# EAGLE library part OPA4227UA_2K5 (library OPA4227UA_2K5)
Quad high precision, low noise operational amplifiers Source: Datasheet <https://www.ti.com/lit/ds/symlink/opa4227.pdf?ts=1606823862376&ref_url=https%3A%2F%2Fwww.ti.com%2Fstore%2Fti%2Fen%2Fp%2Fproduct%2F%3Fp%3DOPA4227UA%2F2K5%26keyMatch%3DOPA4227UA%2F2K5%26tisearch%3DSearch-EN-everything%26u>
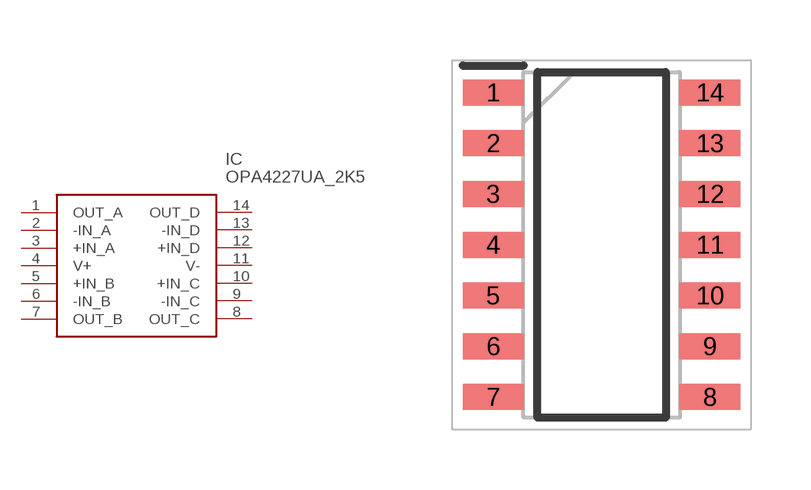
[diagram p0: symbol with the pads of SOIC127P600X175-14N; footprint SOIC127P600X175-14N]

Designator prefix IC

## OPA4227UA_2K5 (DESCRIPTION: Quad high precision, low noise operational amplifiers; HEIGHT: 1.75mm; MANUFACTURER_NAME: Texas Instruments; MANUFACTURER_PART_NUMBER: OPA4227UA/2K5; MOUSER_PART_NUMBER: 595-OPA4227UA/2K5; MOUSER_PRICE-STOCK: https://www.mouser.co.uk/ProductDetail/Texas-Instruments/OPA4227UA-2K5?qs=7nS3%252BbEUL6sszF9GzvFuhg%3D%3D)  [SOIC127P600X175-14N]
1  OUT_A
2  -IN_A
3  +IN_A
4  V+
5  +IN_B
6  -IN_B
7  OUT_B
8  OUT_C
9  -IN_C
10  +IN_C
11  V-
12  +IN_D
13  -IN_D
14  OUT_D

## Footprint SOIC127P600X175-14N (pad centres in mm)
D (R-PDSO-G14)
smd 1.525 x 0.65: 1 -2.712,3.81; 2 -2.712,2.54; 3 -2.712,1.27; 4 -2.712,0; 5 -2.712,-1.27; 6 -2.712,-2.54; 7 -2.712,-3.81; 8 2.712,-3.81; 9 2.712,-2.54; 10 2.712,-1.27; 11 2.712,0; 12 2.712,1.27; 13 2.712,2.54; 14 2.712,3.81